# Altium schematic symbol library Schematic_lib_meba's.SchLib: 12 symbols
Pins are listed as number, name and electrical type; pins without a type are passive.

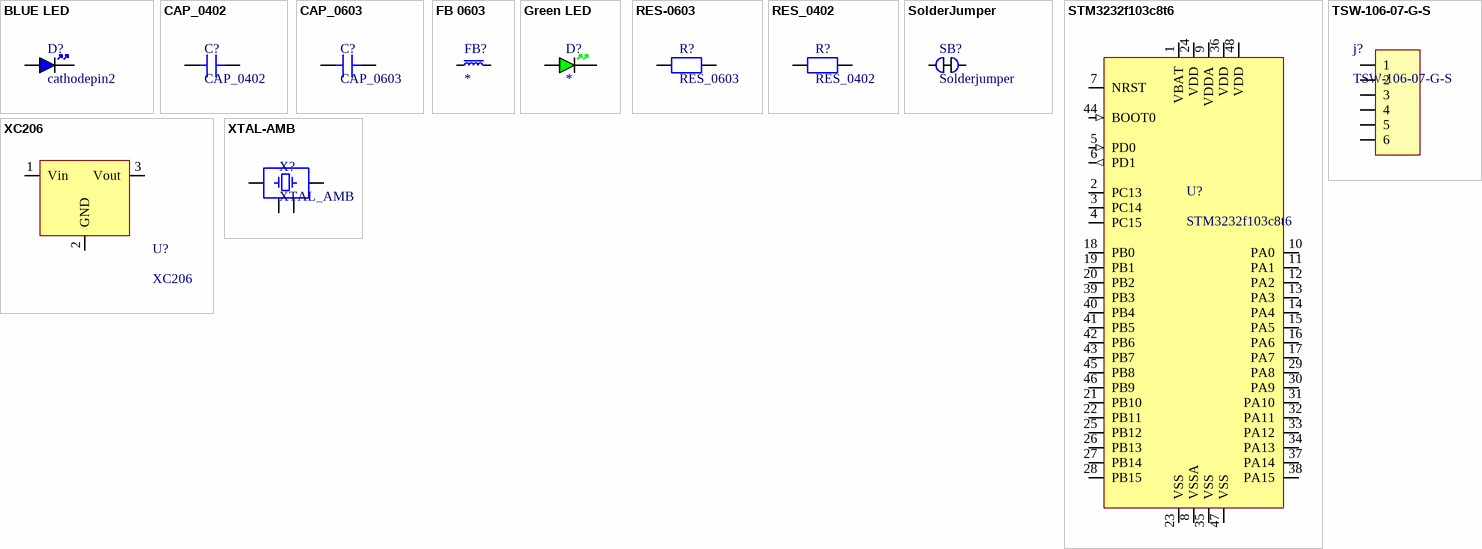
[diagram p0: symbols BLUE LED to XTAL-AMB]

## BLUE LED
designator D?, comment cathodepin2
Blue led 0603; Manufacturer: Cree LED; Manufacturer part number: XQAROY-00-0000-000000603
footprint DIOC1608X08N (Chip Diode, 2-Leads, Body 1.60x0.80mm, IPC Medium Density)
footprint DIOC1608X08N (Chip Diode, 2-Leads, Body 1.60x0.80mm, IPC Medium Density)
pins: 1 A, 2 K

## CAP_0402
designator C?
CAP_0402 SMD Generic
footprint CAP_0402 (Chip Capacitor, 2-Leads, Body 1.00x0.50mm, IPC Medium Density)
pins: 1, 2

## CAP_0603
designator C?
Capacitor SMD Generic
footprint CAP_0603 (Chip Capacitor, 2-Leads, Body 1.60x0.80mm, IPC Medium Density)
pins: 1, 2

## FB 0603
designator FB?
Generric ferrite bead 0603
footprint Ferrite bead (FERRITE BEAD 470 OHM 0603 1LN)
pins: 1, 2

## Green LED
designator D?
GREEN LED  0603; Manufacture: *; Manufacture part number: *
footprint DIOC1608X08N (Chip Diode, 2-Leads, Body 1.60x0.80mm, IPC Medium Density)
pins: 1 A, 2 K

## RES-0603
designator R?, comment RES_0603
Reesitor SMD Generic; Manufacturer: FH (Guangdong Fenghua Advanced Tech); Manufacturer part number: RS-03L2R7JT
footprint RESC1608X08N (Chip Resistor, 2-Leads, Body 1.60x0.80mm, IPC Medium Density)
pins: 1, 2

## RES_0402
designator R?
RES_0402 SMD Generic
footprint RES_0402 (Chip Resistor, 2-Leads, Body 1.00x0.50mm, IPC Medium Density)
pins: 1, 2

## SolderJumper
designator SB?, comment Solderjumper
footprint SolderJumper
footprint SolderJumper
pins: 1, 2

## STM3232f103c8t6
designator U?
STM32 STM32f103c8t6 MCU; Manufacturer: STM32; Manufacture part number: STM3232f103c8t6
footprint TSQFP50P900X900X160-48N (TSQFP, 48-Leads, Body 7.00x7.00mm, Pitch 0.50mm, IPC Medium Density)
pins: 1 VBAT (power), 2 PC13 (io), 3 PC14 (io), 4 PC15 (io), 5 PD0 (in), 6 PD1 (out), 7 NRST (io), 8 VSSA (power), 9 VDDA (power), 10 PA0 (io), 11 PA1 (io), 12 PA2 (io), 13 PA3 (io), 14 PA4 (io), 15 PA5 (io), 16 PA6 (io), 17 PA7 (io), 18 PB0 (io), 19 PB1 (io), 20 PB2 (io), 21 PB10 (io), 22 PB11 (io), 23 VSS (power), 24 VDD (power), 25 PB12 (io), 26 PB13 (io), 27 PB14 (io), 28 PB15 (io), 29 PA8 (io), 30 PA9 (io), 31 PA10 (io), 32 PA11 (io), 33 PA12 (io), 34 PA13 (io), 35 VSS (power), 36 VDD (power), 37 PA14 (io), 38 PA15 (io), 39 PB3 (io), 40 PB4 (io), 41 PB5 (io), 42 PB6 (io), 43 PB7 (io), 44 BOOT0 (in), 45 PB8 (io), 46 PB9 (io), 47 VSS (power), 48 VDD (power)

## TSW-106-07-G-S
designator j?
CONN HEADER VERT 6POS 2.54MM; Manufacturer: Samtec Inc.; Manufacturer part number: TSW-106-07-G-S
footprint Header 1X6
pins: 1, 2, 3, 4, 5, 6

## XC206
designator U?
-40℃~+85℃@(Ta) 1 1uA 200mA 3.3V 6V Fixed Over Current Protection Positive SOT-23-3L Voltage Regulators - Linear, Low Drop Out (LDO) Regulators ROHS; Manufacturer part number: XC6206P332MR-G; Manufacturer: Torex Semicon
footprint SOT95P280X120-3N (SOT23, 3-Leads, Body 2.90x2.80mm, Pitch 0.95mm, IPC Medium Density)
pins: 1 Vin, 2 GND (power), 3 Vout

## XTAL-AMB
designator X?, comment XTAL_AMB
CRYSTAL 8.0000MHZ 18PF SMD; Manufacturer: Abracon LLC; Manufacturer part number: 535-9720-2-ND
footprint XTAL - AMB
pins: 1, 2, 3, 4